# Altium schematic symbol library components.SchLib: 127 symbols
Pins are listed as number, name and electrical type; pins without a type are passive.

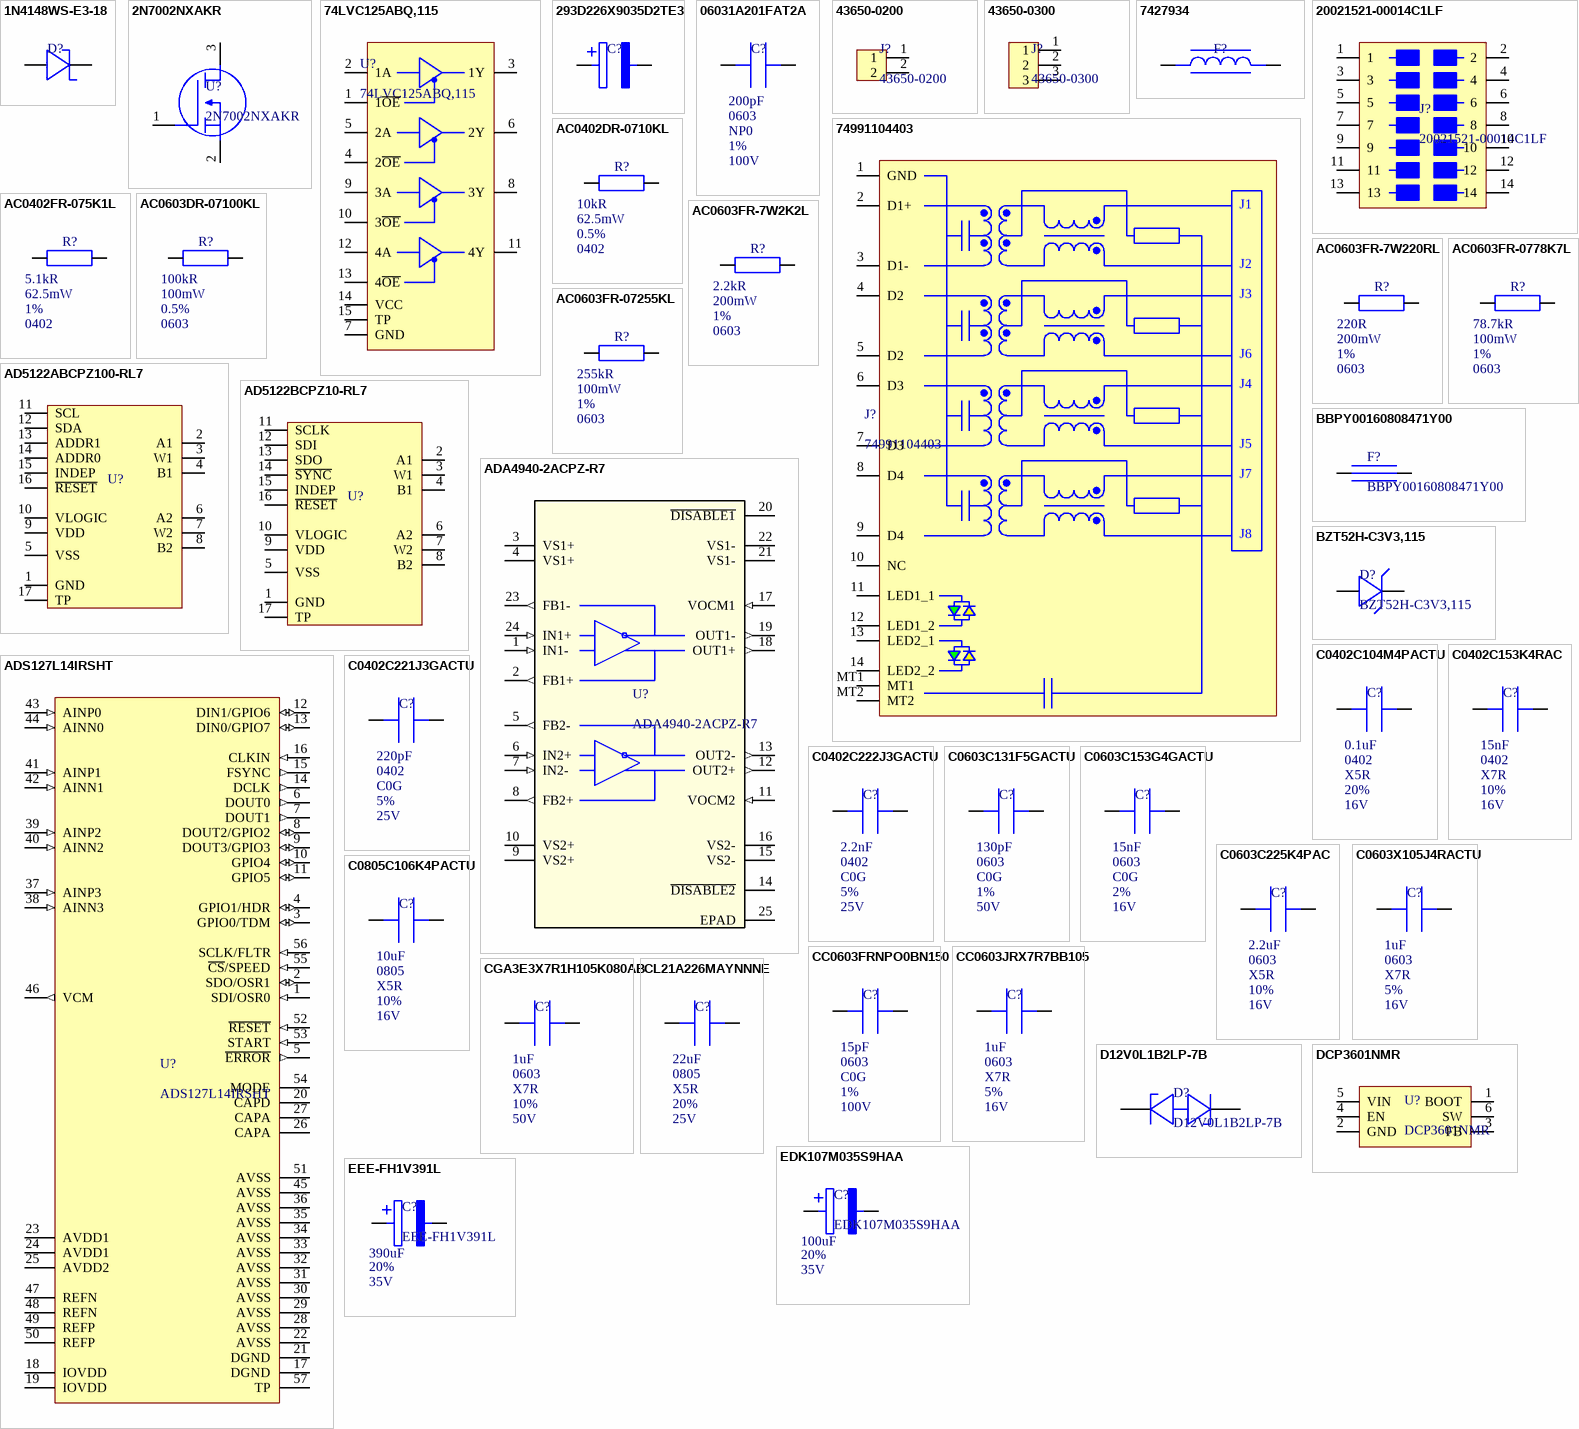
[diagram p0: symbols 1N4148WS-E3-18 to EEE-FH1V391L]

## 1N4148WS-E3-18
designator D?  (value not drawn)
Small Signal Switching Diodes 100 Volt 350mA 4ns; Manufacturer: Vishay; Package: SOD-323-2; Supplier 1: Mouser; Supplier Part Number 1: 78-1N4148WS-E3-18
footprint DIOC_SOD323_P
pins: 1, 2

## 2N7002NXAKR
designator U?
MOSFETs SOT23 N-CH 60V .3A; Manufacturer: Nexperia; Package: SOT23-3; Supplier 1: Mouser; Supplier Part Number 1: 771-2N7002NXAKR
footprint IC_SOT-23-3 (SOT23, 3-Leads, Body 2,90x2,90mm, Pitch 0,95mm, IPC Medium Density)
pins: 1 G, 2 S, 3 D

## 74LVC125ABQ,115
designator U?
Buffers & Line Drivers SOT762-1 BUFFERS & LINE DVRS; Manufacturer: Nexperia; Package: DHVQFN-14; Supplier 1: Mouser; Supplier Part Number 1: 771-LVC125ABQ115
footprint IC_DHVQFN-14
pins: 1 1~{OE}, 2 1A, 3 1Y, 4 2~{OE}, 5 2A, 6 2Y, 7 GND, 8 3Y, 9 3A, 10 3~{OE}, 11 4Y, 12 4A, 13 4~{OE}, 14 VCC, 15 TP

## 293D226X9035D2TE3
designator C?  (value not drawn)
Tantalum Capacitors - Solid SMD 22uF 35volts 10% D case Molded; Manufacturer: Vishay; Voltage: 35V; Value: 22uF; Tolerance: 10%; Package: 2917; Supplier 1: Mouser; Supplier Part Number 1: 74-293D226X9035D2TE3
footprint CAPC_2917_P
pins: 1, 2

## 06031A201FAT2A
designator C?  value 200pF  Voltage: 100V  Tolerance: 1%  Dielectric: NP0  Package: 0603  (hidden comment: 06031A201FAT2A)
Multilayer Ceramic Capacitors MLCC - SMD/SMT 100V 200pF NP0 0603 +1%; Manufacturer: KYOCERA AVX; Supplier 1: Mouser; Supplier Part Number 1: 581-06031A201FAT2A
footprint CAPC_0603 (Chip Capacitor, 2-Leads, Body 1,60x0,80mm, IPC Medium Density)
pins: 1, 2

## 43650-0200
designator J?
Nr Mouser: / 538-43650-0200 / Nr prod.: / 43650-0200 / Produc.: / Molex / Nr klienta: / Nr klienta / Opis: / Headers & Wire Housings R/A HEADER 2 POS TIN SINGLE ROW; Pin number: 2; Manufacturer: Molex; Supplier 1: Mouser; Supplier Part Number 1: 538-43650-0200
footprint CONT_43650-0200
pins: 1, 2

## 43650-0300
designator J?
Headers & Wire Housings R/A HEADER 3 POS TIN SINGLE ROW; Manufacturer: Molex; Pin number: 3; Supplier 1: Mouser; Supplier Part Number 1: 538-43650-0300
footprint CONT_43650-0300
pins: 1, 2, 3

## 7427934
designator F?  (value not drawn)
Ferrite Beads WE-PBF 4030 42 Ohms IR = 15 A RDC = 0.6 mOhms; Manufacturer: Wurth Elektronik; Package: 4030; Supplier 1: Mouser; Supplier Part Number 1: 710-7427934
footprint FERC_4030
pins: 1, 2

## 20021521-00014C1LF
designator J?
Headers & Wire Housings VERTICAL SMT TYPE HEADER; Manufacturer: Amphenol FCI; Supplier 1: Mouser; Supplier Part Number 1: 649-202152100014C1LF
footprint CONS_20021521-00014C1LF
pins: 1, 2, 3, 4, 5, 6, 7, 8, 9, 10, 11, 12, 13, 14

## 74991104403
designator J?
Modular Connectors / Ethernet Connectors WE-RJ45LAN 10/100/1000BASE-T THT 1x1 LED L green/yellow LED R green/yellow; Manufacturer: Wurth Elektronik; Supplier 1: Mouser; Supplier Part Number 1: 710-74991104403
footprint CONT_74991104403
pins: 1 GND, 2 D1+, 3 D1-, 4 D2, 5 D2, 6 D3, 7 D3, 8 D4, 9 D4, 10 NC, 11 LED1_1, 12 LED1_2, 13 LED2_1, 14 LED2_2, MT1, MT2
text: J1; J2; J3; J6; J4; J5; J7; J8

## AC0402DR-0710KL
designator R?  value 10kR  Package: 0402  Tolerance: 0.5%  Power: 62.5mW  (hidden comment: AC0402DR-0710KL)
Thick Film Resistors - SMD 10 kOhms 1/16 W 50 V 1% 0402 100 PPM / C - 55 C + 155 C AEC-Q200; Manufacturer: YAGEO; Supplier 1: Mouser; Supplier Part Number 1: 603-AC0402DR-0710KL
footprint RESC_0402 (Chip Resistor, 2-Leads, Body 1,00x0,50mm, IPC Medium Density)
pins: 1, 2

## AC0402FR-075K1L
designator R?  value 5.1kR  Package: 0402  Tolerance: 1%  Power: 62.5mW  (hidden comment: AC0402FR-075K1L)
Thick Film Resistors - SMD 5.1 kOhms 1/16 W 50 V 1 % 0402 100 PPM / C - 55 C / + 155 C AEC-Q200; Manufacturer: YAGEO; Supplier 1: Mouser; Supplier Part Number 1: 603-AC0402FR-075K1L
footprint RESC_0402 (Chip Resistor, 2-Leads, Body 1,00x0,50mm, IPC Medium Density)
pins: 1, 2

## AC0603DR-07100KL
designator R?  value 100kR  Package: 0603  Tolerance: 0.5%  Power: 100mW  (hidden comment: AC0603DR-07100KL)
Thick Film Resistors - SMD 100 kOhms 1/10 W 75 V 0.5 % 0603 100 PPM / C - 55 C / + 155 C AEC-Q200; Manufacturer: YAGEO; Supplier 1: Mouser; Supplier Part Number 1: 603-AC0603DR-07100KL
footprint RESC_0603 (Chip Resistor, 2-Leads, Body 1,55x0,85mm, IPC Medium Density)
pins: 1, 2

## AC0603FR-7W2K2L
designator R?  value 2.2kR  Package: 0603  Tolerance: 1%  Power: 200mW  (hidden comment: AC0603FR-7W2K2L)
Thick Film Resistors 2.2 kOhms 1/5 W 75 V 1% 0603 100 PPM / C - 55 C / + 155 C AEC-Q200; Manufacturer: YAGEO; Supplier 1: Mouser; Supplier Part Number 1: 603-AC0603FR-7W2K2L
footprint RESC_0603 (Chip Resistor, 2-Leads, Body 1,55x0,85mm, IPC Medium Density)
pins: 1, 2

## AC0603FR-7W220RL
designator R?  value 220R  Package: 0603  Tolerance: 1%  Power: 200mW  (hidden comment: AC0603FR-7W220RL)
Thick Film Resistors - SMD 220 Ohms 1/5 W 75 V 1% 0603 100 PPM / C - 55 C / + 155 C AEC-Q200; Manufacturer: YAGEO; Supplier 1: Mouser; Supplier Part Number 1: 603-AC0603FR-7W220RL
footprint RESC_0603 (Chip Resistor, 2-Leads, Body 1,55x0,85mm, IPC Medium Density)
pins: 1, 2

## AC0603FR-0778K7L
designator R?  value 78.7kR  Package: 0603  Tolerance: 1%  Power: 100mW  (hidden comment: AC0603FR-0778K7L)
Thick Film Resistors - SMD 78.7 kOhms 1/10 W 75 V 1% 0603 100 PPM / C - 55 C / + 155 C AEC-Q200; Manufacturer: YAGEO; Supplier 1: Mouser; Supplier Part Number 1: 603-AC0603FR-0778K7L
footprint RESC_0603 (Chip Resistor, 2-Leads, Body 1,55x0,85mm, IPC Medium Density)
pins: 1, 2

## AC0603FR-07255KL
designator R?  value 255kR  Package: 0603  Tolerance: 1%  Power: 100mW  (hidden comment: AC0603FR-07255KL)
Thick Film Resistors - SMD 255 kOhms 1/10 W 75 V 1 % 0603 100 PPM / C - 55 C / + 155 C AEC-Q200; Manufacturer: YAGEO; Supplier 1: Mouser; Supplier Part Number 1: 603-AC0603FR-07255KL
footprint RESC_0603 (Chip Resistor, 2-Leads, Body 1,55x0,85mm, IPC Medium Density)
pins: 1, 2

## AD5122ABCPZ100-RL7
designator U?  (value not drawn)
Digital Potentiometer ICs 128tap, Dual DigiPOT, NVM, I2C; Manufacturer: Analog Devices; Package: LFCSP-16; Supplier 1: Mouser; Supplier Part Number 1: 584-AD5122ABCPZ100R7
footprint IC_LFCSP-16
pins: 1 GND, 2 A1, 3 W1, 4 B1, 5 VSS, 6 A2, 7 W2, 8 B2, 9 VDD, 10 VLOGIC, 11 SCL, 12 SDA, 13 ADDR1, 14 ADDR0, 15 INDEP, 16 ~{RESET}, 17 TP

## AD5122BCPZ10-RL7
designator U?  (value not drawn)
Digital Potentiometer ICs 128tap, Dual DigiPOT, NVM, SPI; Manufacturer: Analog Devices; Package: LFCSP-16; Supplier 1: Mouser; Supplier Part Number 1: 584-AD5122BCPZ10-R7
footprint IC_LFCSP-16
pins: 1 GND, 2 A1, 3 W1, 4 B1, 5 VSS, 6 A2, 7 W2, 8 B2, 9 VDD, 10 VLOGIC, 11 SCLK, 12 SDI, 13 SDO, 14 ~{SYNC}, 15 INDEP, 16 ~{RESET}, 17 TP

## ADA4940-2ACPZ-R7
designator U?
Differential Amplifiers Sub 10M W ADC Driver for PULSAR Family; Manufacturer: Analog Devices; Package: LFCSP-24; Supplier 1: Mouser; Supplier Part Number 1: 584-ADA4940-2ACPZ-R7
footprint IC_QFN-24_UF_LIT
pins: 1 IN1- (in), 2 FB1+ (out), 3 VS1+ (power), 4 VS1+ (power), 5 FB2- (out), 6 IN2+ (in), 7 IN2- (in), 8 FB2+ (out), 9 VS2+ (power), 10 VS2+ (power), 11 VOCM2 (in), 12 OUT2+ (out), 13 OUT2- (out), 14 ~{DISABLE2}, 15 VS2- (power), 16 VS2- (power), 17 VOCM1 (in), 18 OUT1+ (out), 19 OUT1- (out), 20 ~{DISABLE1}, 21 VS1- (power), 22 VS1- (power), 23 FB1- (out), 24 IN1+ (in), 25 EPAD

## ADS127L14IRSHT
designator U?
Analog to Digital Converters - ADC; Manufacturer: Texas Instruments; Package: VQFN-56; Supplier 1: Mouser; Supplier Part Number 1: 595-ADS127L14IRSHT
footprint IC_VQFN56 (VQFN, 56-Leads, Body 7,00x7,00mm, Pitch 0,40mm, Thermal Pad 5,28x5,28mm, IPC Medium Density)
pins: 1 SDI/OSR0 (in), 2 SDO/OSR1 (io), 3 GPIO0/TDM (io), 4 GPIO1/HDR (io), 5 ~{ERROR} (out), 6 DOUT0 (out), 7 DOUT1 (out), 8 DOUT2/GPIO2 (io), 9 DOUT3/GPIO3 (io), 10 GPIO4 (io), 11 GPIO5 (io), 12 DIN1/GPIO6 (io), 13 DIN0/GPIO7 (io), 14 DCLK (out), 15 FSYNC (out), 16 CLKIN (in), 17 DGND, 18 IOVDD, 19 IOVDD, 20 CAPD, 21 DGND, 22 AVSS, 23 AVDD1, 24 AVDD1, 25 AVDD2, 26 CAPA, 27 CAPA, 28 AVSS, 29 AVSS, 30 AVSS, 31 AVSS, 32 AVSS, 33 AVSS, 34 AVSS, 35 AVSS, 36 AVSS, 37 AINP3 (in), 38 AINN3 (in), 39 AINP2 (in), 40 AINN2 (in), 41 AINP1 (in), 42 AINN1 (in), 43 AINP0 (in), 44 AINN0 (in), 45 AVSS, 46 VCM (out), 47 REFN, 48 REFN, 49 REFP, 50 REFP, 51 AVSS, 52 ~{RESET} (in), 53 START (in), 54 MODE, 55 ~{CS}/SPEED (in), 56 SCLK/FLTR (in), 57 TP

## BBPY00160808471Y00
designator F?
Ferrite Beads 470Ohms RDC=0.15Ohms 1500mA; Manufacturer: Pulse Electronics; Package: 0603; Supplier 1: Mouser; Supplier Part Number 1: 603-BBPY160808471Y00
footprint FERC_0603 (Chip Resistor, 2-Leads, Body 1,55x0,85mm, IPC Medium Density)
pins: 1, 2

## BZT52H-C3V3,115
designator D?
Zener Diodes ZENER SOD-123 .83W 3.3V; Manufacturer: Nexperia; Package: SOD-123F-2; Breakdown voltage: 3.3V; Supplier 1: Mouser; Supplier Part Number 1: 771-BZT52H-C3V3-T/R
footprint DIOC_SOD-123F-2
pins: 1, 2

## C0402C104M4PACTU
designator C?  value 0.1uF  Voltage: 16V  Tolerance: 20%  Dielectric: X5R  Package: 0402  (hidden comment: C0402C104M4PACTU)
Multilayer Ceramic Capacitors MLCC - SMD/SMT 16V 0.1uF X5R 0402 20%; Manufacturer: KEMET; Supplier 1: Mouser; Supplier Part Number 1: 80-C0402C104M4P
footprint CAPC_0402 (Chip Capacitor, 2-Leads, Body 1,00x0,50mm, IPC Medium Density)
pins: 1, 2

## C0402C153K4RAC
designator C?  value 15nF  Voltage: 16V  Tolerance: 10%  Dielectric: X7R  Package: 0402  (hidden comment: C0402C153K4RAC)
Multilayer Ceramic Capacitors MLCC - SMD/SMT 16V 0.015uF X7R 0402 10%; Manufacturer: KEMET; Supplier 1: Mouser; Supplier Part Number 1: 80-C0402C153K4RAC
footprint CAPC_0402 (Chip Capacitor, 2-Leads, Body 1,00x0,50mm, IPC Medium Density)
pins: 1, 2

## C0402C221J3GACTU
designator C?  value 220pF  Voltage: 25V  Tolerance: 5%  Dielectric: C0G  Package: 0402  (hidden comment: C0402C221J3GACTU)
Multilayer Ceramic Capacitors MLCC - SMD/SMT 25V 220pF C0G 0402 5%; Manufacturer: KEMET; Supplier 1: Mouser; Supplier Part Number 1: 80-C0402C221J3G
footprint CAPC_0402 (Chip Capacitor, 2-Leads, Body 1,00x0,50mm, IPC Medium Density)
pins: 1, 2

## C0402C222J3GACTU
designator C?  value 2.2nF  Voltage: 25V  Tolerance: 5%  Dielectric: C0G  Package: 0402  (hidden comment: C0402C222J3GACTU)
Multilayer Ceramic Capacitors MLCC - SMD/SMT 25V 2200pF C0G 0402 5%; Manufacturer: KEMET; Supplier 1: Mouser; Supplier Part Number 1: 80-C0402C222J3GACTU
footprint CAPC_0402 (Chip Capacitor, 2-Leads, Body 1,00x0,50mm, IPC Medium Density)
pins: 1, 2

## C0603C131F5GACTU
designator C?  value 130pF  Voltage: 50V  Tolerance: 1%  Dielectric: C0G  Package: 0603  (hidden comment: C0603C131F5GACTU)
Multilayer Ceramic Capacitors MLCC - SMD/SMT 50V 130pF C0G 0603 1%; Manufacturer: KEMET; Supplier 1: Mouser; Supplier Part Number 1: 80-C0603C131F5G
footprint CAPC_0603 (Chip Capacitor, 2-Leads, Body 1,60x0,80mm, IPC Medium Density)
pins: 1, 2

## C0603C153G4GACTU
designator C?  value 15nF  Voltage: 16V  Tolerance: 2%  Dielectric: C0G  Package: 0603  (hidden comment: C0603C153G4GACTU)
Multilayer Ceramic Capacitors MLCC - SMD/SMT 16V 0.015uF C0G 0603 2%; Manufacturer: KEMET; Supplier 1: Mouser; Supplier Part Number 1: 80-C0603C153G4G
footprint CAPC_0603 (Chip Capacitor, 2-Leads, Body 1,60x0,80mm, IPC Medium Density)
pins: 1, 2

## C0603C225K4PAC
designator C?  value 2.2uF  Voltage: 16V  Tolerance: 10%  Dielectric: X5R  Package: 0603  (hidden comment: C0603C225K4PAC)
Multilayer Ceramic Capacitors MLCC - SMD/SMT 16V 2.2uF X5R 0603 10%; Manufacturer: KEMET; Supplier 1: Mouser; Supplier Part Number 1: 80-C0603C225K4PAC
footprint CAPC_0603 (Chip Capacitor, 2-Leads, Body 1,60x0,80mm, IPC Medium Density)
pins: 1, 2

## C0603X105J4RACTU
designator C?  value 1uF  Voltage: 16V  Tolerance: 5%  Dielectric: X7R  Package: 0603  (hidden comment: C0603X105J4RACTU)
Multilayer Ceramic Capacitors MLCC - SMD/SMT 16V 1uF X7R 0603 5% Flex Soft; Manufacturer: KEMET; Supplier 1: Mouser; Supplier Part Number 1: 80-C0603X105J4R
footprint CAPC_0603 (Chip Capacitor, 2-Leads, Body 1,60x0,80mm, IPC Medium Density)
pins: 1, 2

## C0805C106K4PACTU
designator C?  value 10uF  Voltage: 16V  Tolerance: 10%  Dielectric: X5R  Package: 0805  (hidden comment: C0805C106K4PACTU)
Multilayer Ceramic Capacitors MLCC - SMD/SMT 16V 10uF X5R 0805 10%; Manufacturer: KEMET; Supplier 1: Mouser; Supplier Part Number 1: 80-C0805C106K4P
footprint CAPC_0805 (Chip Capacitor, 2-Leads, Body 2,00x1,25mm, IPC Medium Density)
pins: 1, 2

## CC0603FRNPO0BN150
designator C?  value 15pF  Voltage: 100V  Tolerance: 1%  Dielectric: C0G  Package: 0603  (hidden comment: CC0603FRNPO0BN150)
Multilayer Ceramic Capacitors MLCC - SMD/SMT 100V 15pF C0G 0603 1%; Manufacturer: YAGEO; Supplier 1: Mouser; Supplier Part Number 1: 603-CC603FRNPO0BN150
footprint CAPC_0603 (Chip Capacitor, 2-Leads, Body 1,60x0,80mm, IPC Medium Density)
pins: 1, 2

## CC0603JRX7R7BB105
designator C?  value 1uF  Voltage: 16V  Tolerance: 5%  Dielectric: X7R  Package: 0603  (hidden comment: CC0603JRX7R7BB105)
Multilayer Ceramic Capacitors MLCC - SMD/SMT 16V 1uF X7R 0603 5% HI CV; Manufacturer: YAGEO; Supplier 1: Mouser; Supplier Part Number 1: 603-CC0603JRX77BB105
footprint CAPC_0603 (Chip Capacitor, 2-Leads, Body 1,60x0,80mm, IPC Medium Density)
pins: 1, 2

## CGA3E3X7R1H105K080AB
designator C?  value 1uF  Voltage: 50V  Tolerance: 10%  Dielectric: X7R  Package: 0603  (hidden comment: CGA3E3X7R1H105K080AB)
Multilayer Ceramic Capacitors MLCC - SMD/SMT Automotive Grade,MLCC,0603,X7R,50V,1uF,+/-10%,0.8mm; Manufacturer: TDK; Supplier 1: Mouser; Supplier Part Number 1: 810-CGA3E3X7R1H105K0
footprint CAPC_0603 (Chip Capacitor, 2-Leads, Body 1,60x0,80mm, IPC Medium Density)
pins: 1, 2

## CL21A226MAYNNNE
designator C?  value 22uF  Voltage: 25V  Tolerance: 20%  Dielectric: X5R  Package: 0805  (hidden comment: CL21A226MAYNNNE)
Multilayer Ceramic Capacitors MLCC - SMD/SMT 22uF+/-20% 25V X5R 2 0805; Manufacturer: TAIYO YUDEN; Supplier 1: Mouser; Supplier Part Number 1: 187-CL21A226MAYNNNE
footprint CAPC_0805 (Chip Capacitor, 2-Leads, Body 2,00x1,25mm, IPC Medium Density)
pins: 1, 2

## D12V0L1B2LP-7B
designator D?
ESD Protection Diodes / TVS Diodes Data Line Protection TVS Bi 13V 4A 10pF; Manufacturer: Diodes Incorporated; Voltage: 12V; Package: DFN1006-2; Capacitance: 10pF; Supplier 1: Mouser; Supplier Part Number 1: 621-D12V0L1B2LP-7B
footprint DIOC_DFN-1006-2
pins: 1, 2

## DCP3601NMR
designator U?
Switching Voltage Regulators 36 V, 1 A synchronous step-down converter in SOT23-6L; Manufacturer: STMicroelectronics; Package: SOT23-6; Supplier 1: Mouser; Supplier Part Number 1: 511-DCP3601NMR
footprint IC_SOT23-6 (SOT23, 6-Leads, Body 2,90x2,90mm, Pitch 0,95mm, IPC Medium Density)
pins: 1 BOOT, 2 GND, 3 FB, 4 EN, 5 VIN, 6 SW

## EDK107M035S9HAA
designator C?  value 100uF  Voltage: 35V  Tolerance: 20%
Aluminum Electrolytic Capacitors - SMD 35V 100uF AEC-Q200 20% 85C/2K Hours; Manufacturer: KEMET; Package: 6.3x7.7; Supplier 1: Mouser; Supplier Part Number 1: 80-EDK107M035S9HAA
footprint CAPE_6.3R_7.7H
pins: 1, 2

## EEE-FH1V391L
designator C?  value 390uF  Voltage: 35V  Tolerance: 20%
Aluminium Electrolytic Capacitors - SMD 35VDC 390uF 20% Halogen Free AEC-Q200; Manufacturer: Panasonic; Package: 10x10.2; Supplier 1: Mouser; Supplier Part Number 1: 667-EEE-FH1V391L
footprint CAPE_10R_10H (Aluminum Electrolytic Capacitor, Body 10,30x10,30x10,50mm, IPC Medium Density)
pins: 1, 2

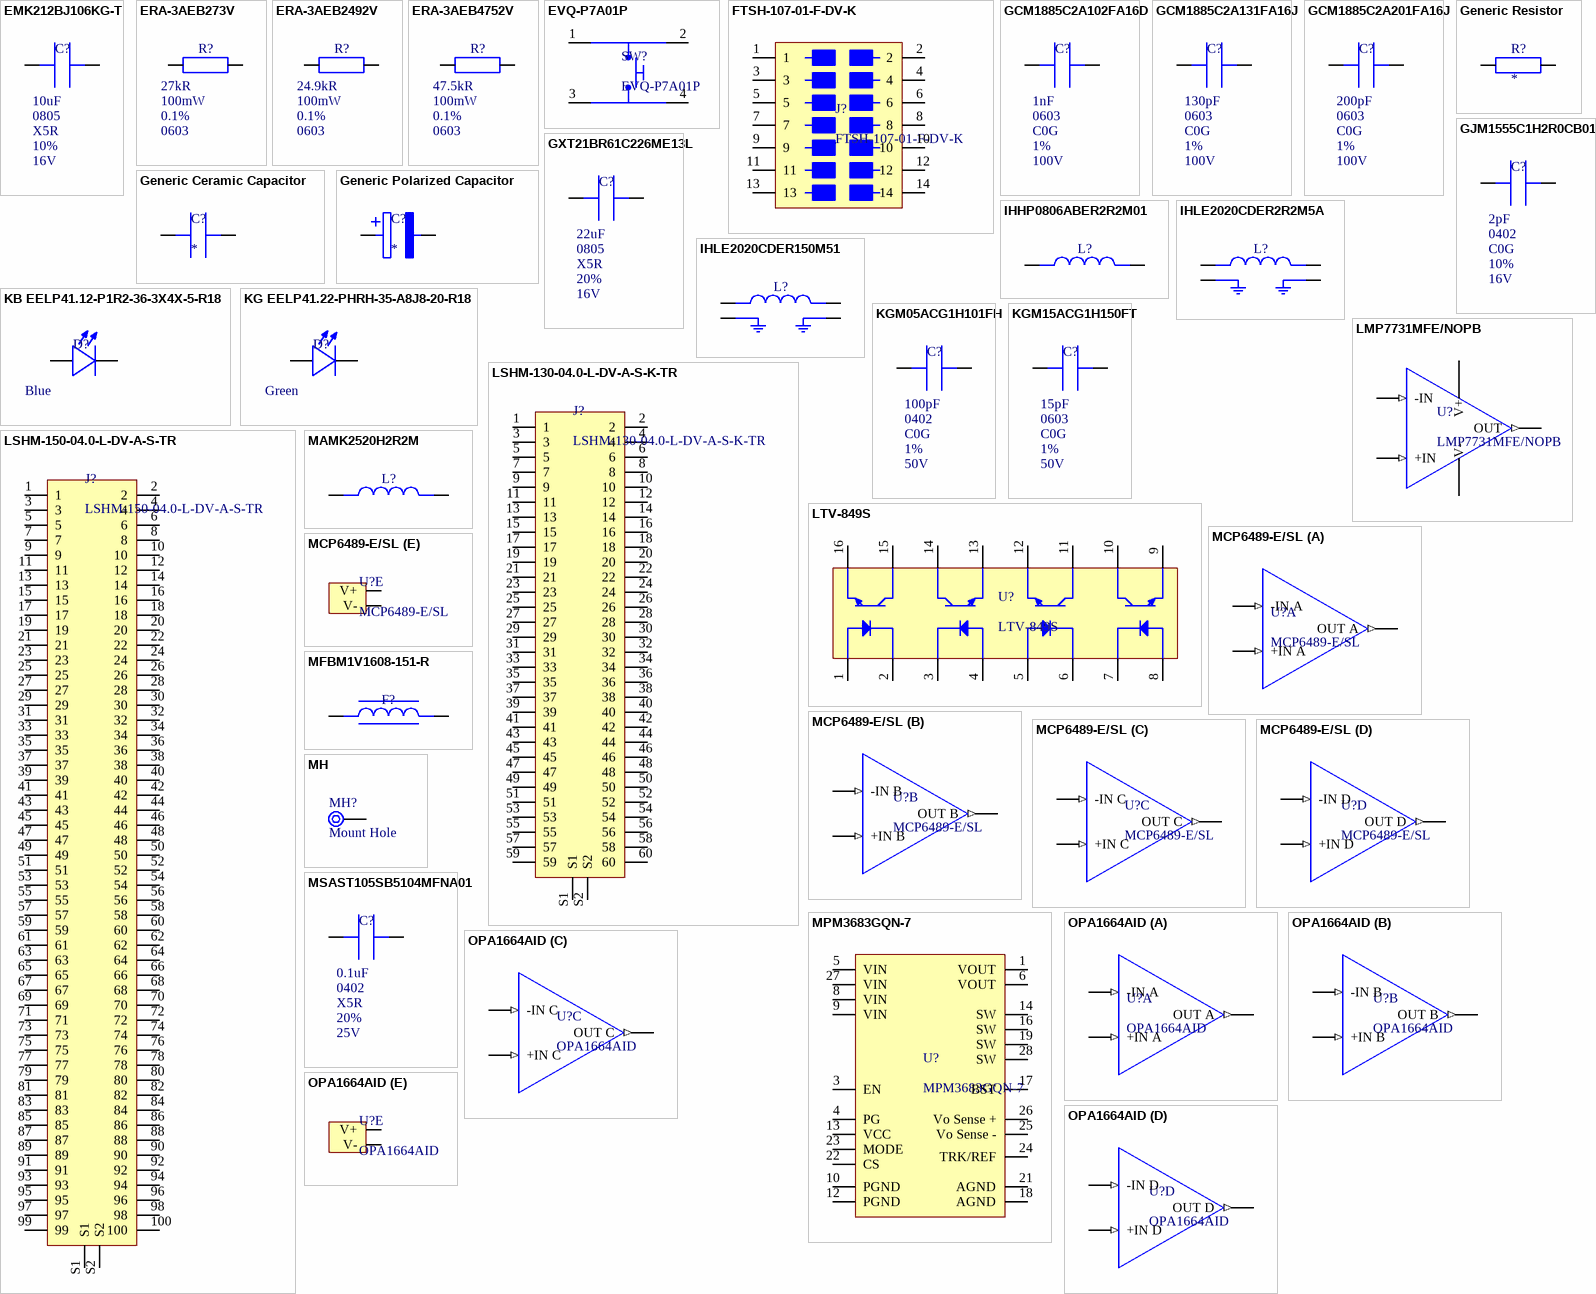
[diagram p1: symbols EMK212BJ106KG-T to OPA1664AID]

## EMK212BJ106KG-T
designator C?  value 10uF  Voltage: 16V  Tolerance: 10%  Dielectric: X5R  Package: 0805  (hidden comment: EMK212BJ106KG-T)
Multilayer Ceramic Capacitors MLCC - SMD/SMT 16V 10uF X5R 0805 10 %; Manufacturer: TAIYO YUDEN; Supplier 1: Mouser; Supplier Part Number 1: 963-EMK212BJ106KG-T
footprint CAPC_0805 (Chip Capacitor, 2-Leads, Body 2,00x1,25mm, IPC Medium Density)
pins: 1, 2

## ERA-3AEB273V
designator R?  value 27kR  Package: 0603  Tolerance: 0.1%  Power: 100mW  (hidden comment: ERA-3AEB273V)
Thin Film Resistors 0603 1/10W 27Kohms; Manufacturer: Panasonic; Supplier 1: Mouser; Supplier Part Number 1: 667-ERA-3AEB273V
footprint RESC_0603 (Chip Resistor, 2-Leads, Body 1,55x0,85mm, IPC Medium Density)
pins: 1, 2

## ERA-3AEB2492V
designator R?  value 24.9kR  Package: 0603  Tolerance: 0.1%  Power: 100mW  (hidden comment: ERA-3AEB2492V)
Thin Film Resistors 0603 24.9Kohm 0.1% 25ppm; Manufacturer: Panasonic; Supplier 1: Mouser; Supplier Part Number 1: 667-ERA-3AEB2492V
footprint RESC_0603 (Chip Resistor, 2-Leads, Body 1,55x0,85mm, IPC Medium Density)
pins: 1, 2

## ERA-3AEB4752V
designator R?  value 47.5kR  Package: 0603  Tolerance: 0.1%  Power: 100mW  (hidden comment: ERA-3AEB4752V)
Thin Film Resistors 0603 47.5Kohm 0.1% 25ppm; Manufacturer: Panasonic; Supplier 1: Mouser; Supplier Part Number 1: 667-ERA-3AEB4752V
footprint RESC_0603 (Chip Resistor, 2-Leads, Body 1,55x0,85mm, IPC Medium Density)
pins: 1, 2

## EVQ-P7A01P
designator SW?
Tactile Switches 3.5x2.9mm Right Ang Light Touch Switch; Manufacturer: Panasonic; Supplier 1: Mouser; Supplier Part Number 1: 667-EVQP7A01P
footprint SWS_EVQP7A
pins: 1, 2, 3, 4

## FTSH-107-01-F-DV-K
designator J?
Headers & Wire Housings High Reliability Header Strips; Manufacturer: Samtec; Supplier 1: Mouser; Supplier Part Number 1: 200-FTSH10701FDVK
footprint CONS_FTSH-107-01-F-DV-K
pins: 1, 2, 3, 4, 5, 6, 7, 8, 9, 10, 11, 12, 13, 14

## GCM1885C2A102FA16D
designator C?  value 1nF  Voltage: 100V  Tolerance: 1%  Dielectric: C0G  Package: 0603  (hidden comment: GCM1885C2A102FA16D)
Multilayer Ceramic Capacitors MLCC - SMD/SMT 1000 pF 100 VDC 1% 0603 C0G (NP0) AEC-Q200; Manufacturer: Murata Electronics; Supplier 1: Mouser; Supplier Part Number 1: 81-GCM1885C2A102FA6D
footprint CAPC_0603 (Chip Capacitor, 2-Leads, Body 1,60x0,80mm, IPC Medium Density)
pins: 1, 2

## GCM1885C2A131FA16J
designator C?  value 130pF  Voltage: 100V  Tolerance: 1%  Dielectric: C0G  Package: 0603  (hidden comment: GCM1885C2A131FA16J)
Multilayer Ceramic Capacitors MLCC - SMD/SMT 130 pF 100 VDC 1% 0603 C0G (NP0) AEC-Q200; Manufacturer: Murata Electronics; Supplier 1: Mouser; Supplier Part Number 1: 81-GCM1885C2A131FA6J
footprint CAPC_0603 (Chip Capacitor, 2-Leads, Body 1,60x0,80mm, IPC Medium Density)
pins: 1, 2

## GCM1885C2A201FA16J
designator C?  value 200pF  Voltage: 100V  Tolerance: 1%  Dielectric: C0G  Package: 0603  (hidden comment: GCM1885C2A201FA16J)
Multilayer Ceramic Capacitors MLCC - SMD/SMT 200 pF 100 VDC 1% 0603 C0G (NP0) AEC-Q200; Manufacturer: Murata Electronics; Supplier 1: Mouser; Supplier Part Number 1: 81-GCM1885C2A201FA6J
footprint CAPC_0603 (Chip Capacitor, 2-Leads, Body 1,60x0,80mm, IPC Medium Density)
pins: 1, 2

## Generic Ceramic Capacitor
designator C?
Value: *; Package: *; Dielectric: *; Tolerance: *; Voltage: *; Manufacturer: *
pins: 1, 2

## Generic Polarized Capacitor
designator C?
Value: *; Tolerance: *; Voltage: *; Manufacturer: *; Package: *
pins: 1, 2

## Generic Resistor
designator R?
Power: *; Tolerance: *; Value: *; Package: *; Manufacturer: *
pins: 1, 2

## GJM1555C1H2R0CB01J
designator C?  value 2pF  Voltage: 16V  Tolerance: 10%  Dielectric: C0G  Package: 0402  (hidden comment: GJM1555C1H2R0CB01J)
Multilayer Ceramic Capacitors MLCC - SMD/SMT 2 pF 50 VDC 0.25 pF 0402 C0G (NP0); Manufacturer: Murata Electronics; Supplier 1: Mouser; Supplier Part Number 1: 81-GJM1555C1H2R0CB1J
footprint CAPC_0402 (Chip Capacitor, 2-Leads, Body 1,00x0,50mm, IPC Medium Density)
pins: 1, 2

## GXT21BR61C226ME13L
designator C?  value 22uF  Voltage: 16V  Tolerance: 20%  Dielectric: X5R  Package: 0805  (hidden comment: GXT21BR61C226ME13L)
Multilayer Ceramic Capacitors MLCC - SMD/SMT 16V 2.2uF X5R 0603 10%; Manufacturer: Murata Electronics; Supplier 1: Mouser; Supplier Part Number 1: 81-GXT21BR61C226ME3L
footprint CAPC_0805 (Chip Capacitor, 2-Leads, Body 2,00x1,25mm, IPC Medium Density)
pins: 1, 2

## IHHP0806ABER2R2M01
designator L?  (value not drawn)
Power Inductors - SMD 2.2uH 20% LowProfile High Current; Manufacturer: Vishay; Saturation Current: 1.9A; Inductance: 2.2uH; Tolerance: 20%; Package: 0806; Supplier 1: Mouser; Supplier Part Number 1: 70-IHHP0806ABR2R2M01
footprint IND_0806
pins: 1, 2

## IHLE2020CDER2R2M5A
designator L?  (value not drawn)
Power Inductors - SMD 2.2uH 20% w/E-Field AEC-Q200; Manufacturer: Vishay; Saturation Current: 7.9A; Package: 2020; Tolerance: 20%; Inductance: 2.2uH; Supplier 1: Mouser; Supplier Part Number 1: 70-IHLE2020CDR2R2M5A
footprint IND_2020_S
pins: 1, 2, 3, 4

## IHLE2020CDER150M51
designator L?  (value not drawn)
Power Inductors - SMD 15uH 20% w/E-Field; Manufacturer: Vishay; Saturation Current: 2.6A; Package: 2020; Tolerance: 20%; Inductance: 15uH; Supplier 1: Mouser; Supplier Part Number 1: 70-IHLE2020CDR150M51
footprint IND_2020_S
pins: 1, 2, 3, 4

## KB EELP41.12-P1R2-36-3X4X-5-R18
designator D?  color: Blue  (hidden comment: KB EELP41.12-P1R2-36-3X4X-5-R18)
Single Color LEDs; package: 0603; Supplier 1: Mouser; Supplier Part Number 1: 720-P4112P1R2363X4X5
footprint DIOC_0603_LED (Chip Capacitor, 2-Leads, Body 1,60x0,80mm, IPC Medium Density)
pins: 1, 2

## KG EELP41.22-PHRH-35-A8J8-20-R18
designator D?  color: Green  (hidden comment: KG EELP41.22-PHRH-35-A8J8-20-R18)
Single Color LEDs; package: 0603; Supplier 1: Mouser; Supplier Part Number 1: 720-P4122PHRH35A8J82
footprint DIOC_0603_LED (Chip Capacitor, 2-Leads, Body 1,60x0,80mm, IPC Medium Density)
pins: 1, 2

## KGM05ACG1H101FH
designator C?  value 100pF  Voltage: 50V  Tolerance: 1%  Dielectric: C0G  Package: 0402  (hidden comment: KGM05ACG1H101FH)
Multilayer Ceramic Capacitors MLCC - SMD/SMT 50V 100pF C0G 0402 1 %; Manufacturer: KYOCERA AVX; Supplier 1: Mouser; Supplier Part Number 1: 581-04025A101F
footprint CAPC_0402 (Chip Capacitor, 2-Leads, Body 1,00x0,50mm, IPC Medium Density)
pins: 1, 2

## KGM15ACG1H150FT
designator C?  value 15pF  Voltage: 50V  Tolerance: 1%  Dielectric: C0G  Package: 0603  (hidden comment: KGM15ACG1H150FT)
Multilayer Ceramic Capacitors MLCC - SMD/SMT 50V 15pF C0G 0603 1%; Manufacturer: KYOCERA AVX; Supplier 1: Mouser; Supplier Part Number 1: 581-06035A150FAT2A
footprint CAPC_0603 (Chip Capacitor, 2-Leads, Body 1,60x0,80mm, IPC Medium Density)
pins: 1, 2

## LMP7731MFE/NOPB
designator U?
Precision Amplifiers Single 2.9 nV/sqrt(H z) Low Noise Precis A 926-LMP7731MF/NOPB; Manufacturer: Texas Instruments; Package: SOT-23-5; Supplier 1: Mouser; Supplier Part Number 1: 926-LMP7731MFE/NOPB
footprint IC_SOT-23-5 (SOT23, 5-Leads, Body 2,90x2,90mm, Pitch 0,95mm, IPC Medium Density)
pins: 1 OUT (out), 2 V-, 3 +IN (in), 4 -IN (in), 5 V+

## LSHM-130-04.0-L-DV-A-S-K-TR
designator J?
Board to Board & Mezzanine Connectors 0.50 mm Razor Beam(TM) High-Speed Hermaphroditic Terminal/Socket Strip; Manufacturer: Samtec; Supplier 1: Mouser; Supplier Part Number 1: 200-LSHM15004.0LDVAS
footprint CONS_LSHM-130-04.0-L-DV-A-S-TR
pins: 1, 2, 3, 4, 5, 6, 7, 8, 9, 10, 11, 12, 13, 14, 15, 16, 17, 18, 19, 20, 21, 22, 23, 24, 25, 26, 27, 28, 29, 30, 31, 32, 33, 34, 35, 36, 37, 38, 39, 40, 41, 42, 43, 44, 45, 46, 47, 48, 49, 50, 51, 52, 53, 54, 55, 56, 57, 58, 59, 60, S1, S2

## LSHM-150-04.0-L-DV-A-S-TR
designator J?
Board to Board & Mezzanine Connectors 0.50 mm Razor Beam(TM) High-Speed Hermaphroditic Terminal/Socket Strip; Manufacturer: Samtec; Supplier 1: Mouser; Supplier Part Number 1: 200-LSHM15004.0LDVAS
footprint CONS_LSHM-150-04.0-L-DV-A-S-TR
pins: 1, 2, 3, 4, 5, 6, 7, 8, 9, 10, 11, 12, 13, 14, 15, 16, 17, 18, 19, 20, 21, 22, 23, 24, 25, 26, 27, 28, 29, 30, 31, 32, 33, 34, 35, 36, 37, 38, 39, 40, 41, 42, 43, 44, 45, 46, 47, 48, 49, 50, 51, 52, 53, 54, 55, 56, 57, 58, 59, 60, 61, 62, 63, 64, 65, 66, 67, 68, 69, 70, 71, 72, 73, 74, 75, 76, 77, 78, 79, 80, 81, 82, 83, 84, 85, 86, 87, 88, 89, 90, 91, 92, 93, 94, 95, 96, 97, 98, 99, 100, S1, S2

## LTV-849S
designator U?
Transistor Output Optocouplers Optocoupler; Manufacturer: LITEON; Package: PDIP-16 Gull Wing; Supplier 1: Mouser; Supplier Part Number 1: 859-LTV-849S
footprint IC_PDIP-16
pins: 1, 2, 3, 4, 5, 6, 7, 8, 9, 10, 11, 12, 13, 14, 15, 16

## MAMK2520H2R2M
designator L?  (value not drawn)
Power Inductors - SMD 963-LSAPB2520MKT2R2M RPLCMT PN 1008 2.2uH 90mOhmsur; Manufacturer: TAIYO YUDEN; Tolerance: 20%; Saturation Current: 2.8A; Inductance: 2.2uH; Package: 1008; Supplier 1: Mouser; Supplier Part Number 1: 963-MAMK2520H2R2M
footprint IND_1008
pins: 1, 2

## MCP6489-E/SL
designator U?
Manufacturer: Microchip Technology; Package: SOIC-14; Supplier 1: Mouser; Supplier Part Number 1: 494-MCP6489-E/SL
footprint IC_SOIC14 (SOIC, 14-Leads, Body 8,65x3,90mm, Pitch 1,27mm, IPC Medium Density)
part A pins: 1 OUT A (out), 2 -IN A (in), 3 +IN A (in)
part B pins: 5 +IN B (in), 6 -IN B (in), 7 OUT B (out)
part C pins: 8 OUT C (out), 9 -IN C (in), 10 +IN C (in)
part D pins: 12 +IN D (in), 13 -IN D (in), 14 OUT D (out)
part E pins: 4 V+, 11 V-

## MFBM1V1608-151-R
designator F?  (value not drawn)
Ferrite Beads 150 OHM 1.5A SMT; Manufacturer: Eaton Electronics; Package: 0603; Supplier 1: Mouser; Supplier Part Number 1: 704-MFBM1V1608-151-R
footprint FERC_0603 (Chip Resistor, 2-Leads, Body 1,55x0,85mm, IPC Medium Density)
pins: 1, 2

## MH
designator MH?, comment Mount Hole
footprint MT_M2
footprint MT_M3
pins: 1

## MPM3683GQN-7
designator U?
Power Management Modules 2.7V-16V, 8A, Step-Down Power Module; Manufacturer: Monolithic Power Systems (MPS); Supplier 1: Mouser; Supplier Part Number 1: 946-MPM3683GQN-7-Z
footprint IC_MPM3683GQN-7
pins: 1 VOUT, 3 EN, 4 PG, 5 VIN, 6 VOUT, 8 VIN, 9 VIN, 10 PGND, 12 PGND, 13 VCC, 14 SW, 16 SW, 17 BST, 18 AGND, 19 SW, 21 AGND, 22 CS, 23 MODE, 24 TRK/REF, 25 Vo Sense -, 26 Vo Sense +, 27 VIN, 28 SW

## MSAST105SB5104MFNA01
designator C?  value 0.1uF  Voltage: 25V  Tolerance: 20%  Dielectric: X5R  Package: 0402  (hidden comment: MSAST105SB5104MFNA01)
Multilayer Ceramic Capacitors MLCC - SMD/SMT 25V 0.1uF X5R 0402 20%; Manufacturer: TAIYO YUDEN; Supplier 1: Mouser; Supplier Part Number 1: 963-MSAST105SB5104MF
footprint CAPC_0402 (Chip Capacitor, 2-Leads, Body 1,00x0,50mm, IPC Medium Density)
pins: 1, 2

## OPA1664AID
designator U?
Operational Amplifiers - Op Amps Sound Plus Lo-Pwr Lo -Noise Op Amps A 595-OPA1664AIDR; Manufacturer: Texas Instruments; Package: SOIC-14; Supplier 1: Mouser; Supplier Part Number 1: 595-OPA1664AID
footprint IC_SOIC14 (SOIC, 14-Leads, Body 8,65x3,90mm, Pitch 1,27mm, IPC Medium Density)
part A pins: 1 OUT A (out), 2 -IN A (in), 3 +IN A (in)
part B pins: 5 +IN B (in), 6 -IN B (in), 7 OUT B (out)
part C pins: 8 OUT C (out), 9 -IN C (in), 10 +IN C (in)
part D pins: 12 +IN D (in), 13 -IN D (in), 14 OUT D (out)
part E pins: 4 V+, 11 V-

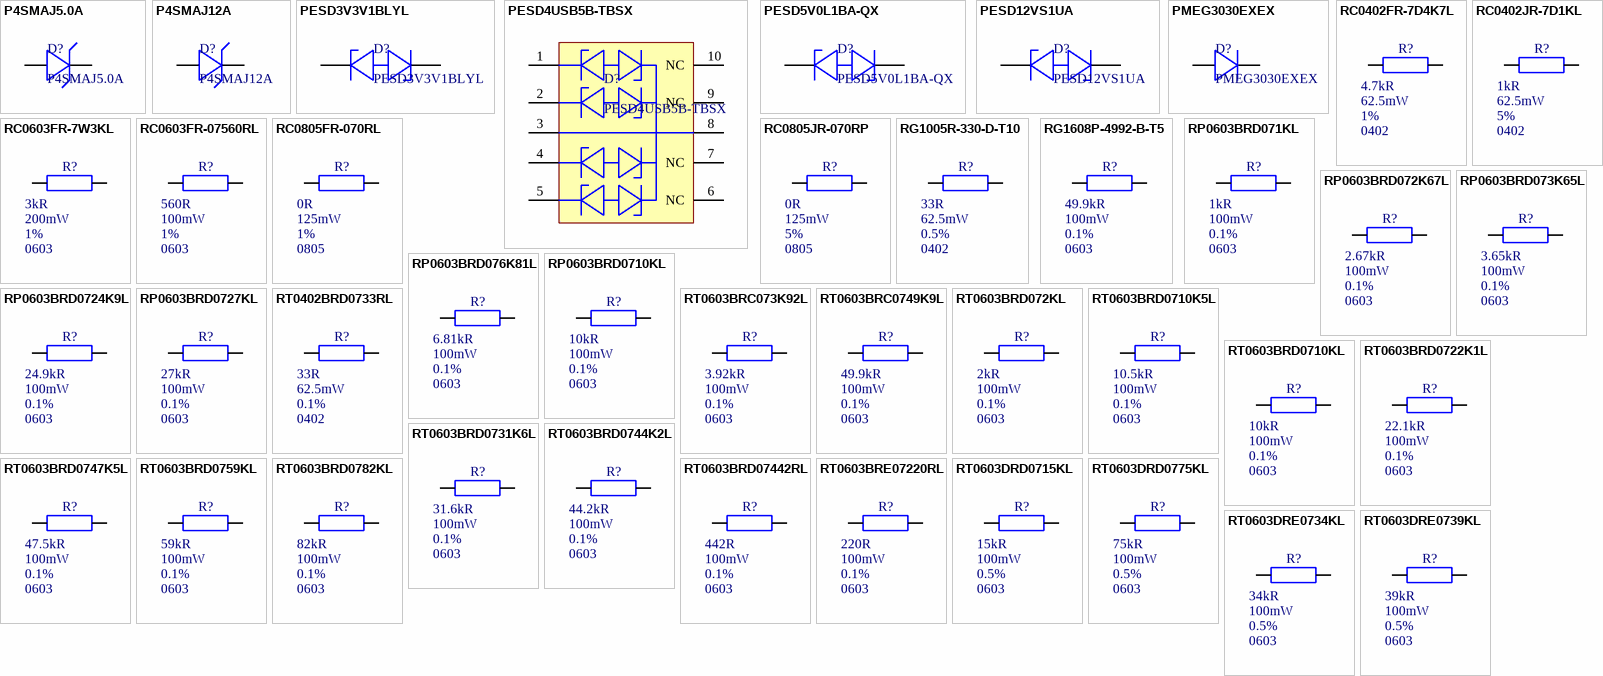
[diagram p2: symbols P4SMAJ5.0A to RT0603DRE0739KL]

## P4SMAJ5.0A
designator D?
ESD Protection Diodes / TVS Diodes TVS, SMA, 150C, 400W, Unidir; Manufacturer: Diotec Semiconductor; Breakdown voltage: 5V; Package: DO-214AC-2; Supplier 1: Mouser; Supplier Part Number 1: 637-P4SMAJ5.0A
footprint DIOC_DO-214AC
pins: 1, 2

## P4SMAJ12A
designator D?
ESD Protection Diodes / TVS Diodes TVS, SMA, 150C, 400W, Unidir; Manufacturer: Diotec Semiconductor; Breakdown voltage: 12V; Package: DO-214AC-2; Supplier 1: Mouser; Supplier Part Number 1: 637-P4SMAJ12A
footprint DIOC_DO-214AC
pins: 1, 2

## PESD3V3V1BLYL
designator D?
ESD Protection Diodes / TVS Diodes SOD882 3.3V BID ESD PROTECT; Manufacturer: Nexperia; Capacitance: 11pF; Package: DFN-1006-2; Voltage: 3.3V; Supplier 1: Mouser; Supplier Part Number 1: 771-PESD3V3V1BLYL
footprint DIOC_DFN-1006-2
pins: 1, 2

## PESD4USB5B-TBSX
designator D?
ESD Protection Diodes / TVS Diodes ESD 5V BI; Manufacturer: Nexperia; Capacitance: 0.3pF; Package: DFN-2510D-10; Voltage: 5V; Supplier 1: Mouser; Supplier Part Number 1: 771-PESD4USB5B-TBSX
footprint DIOC_DFN-2510A-10
pins: 1, 2, 3, 4, 5, 6 NC, 7 NC, 8, 9 NC, 10 NC

## PESD5V0L1BA-QX
designator D?
ESD Protection Diodes / TVS Diodes ESD 5V BI; Manufacturer: Nexperia; Capacitance: 75pF; Package: SOD-323-2; Voltage: 5V; Supplier 1: Mouser; Supplier Part Number 1: 771-PESD5V0L1BA-QX
footprint DIOC_SOD323
pins: 1, 2

## PESD12VS1UA
designator D?
ESD Protection Diodes / TVS Diodes ESD 12V UNI; Manufacturer: Nexperia; Capacitance: 180pF; Package: SOD-323-2; Voltage: 12V; Supplier 1: Mouser; Supplier Part Number 1: 771-PESD12S1UA115
footprint DIOC_SOD323
pins: 1, 2

## PMEG3030EXEX
designator D?
Schottky Diodes & Rectifiers RECT 30V 3A SM SCHOTTKY; Manufacturer: Nexperia; Forward Voltage: 500mV; Package: SOD123HP-2; Current: 3A; Supplier 1: Mouser; Supplier Part Number 1: 771-PMEG3030EXEX
footprint DIOC_SOD123HP-2
pins: 1, 2

## RC0402FR-7D4K7L
designator R?  value 4.7kR  Package: 0402  Tolerance: 1%  Power: 62.5mW  (hidden comment: RC0402FR-7D4K7L)
Thick Film Resistors - SMD General Purpose Chip Resistor 0402, 4.7kOhms, 1%, 1/16W; Manufacturer: YAGEO; Supplier 1: Mouser; Supplier Part Number 1: 603-RC0402FR-7D4K7L
footprint RESC_0402 (Chip Resistor, 2-Leads, Body 1,00x0,50mm, IPC Medium Density)
pins: 1, 2

## RC0402JR-7D1KL
designator R?  value 1kR  Package: 0402  Tolerance: 5%  Power: 62.5mW  (hidden comment: RC0402JR-7D1KL)
Thick Film Resistors - SMD General Purpose Chip Resistor 0402, 1kOhms, 5%, 1/16W; Manufacturer: YAGEO; Supplier 1: Mouser; Supplier Part Number 1: 603-RC0402JR-7D1KL
footprint RESC_0402 (Chip Resistor, 2-Leads, Body 1,00x0,50mm, IPC Medium Density)
pins: 1, 2

## RC0603FR-7W3KL
designator R?  value 3kR  Package: 0603  Tolerance: 1%  Power: 200mW  (hidden comment: RC0603FR-7W3KL)
Thick Film Resistors 2.2 kOhms 1/5 W 75 V 1% 0603 100 PPM / C - 55 C / + 155 C AEC-Q200; Manufacturer: YAGEO; Supplier 1: Mouser; Supplier Part Number 1: 603-RC0603FR-7W3KL
footprint RESC_0603 (Chip Resistor, 2-Leads, Body 1,55x0,85mm, IPC Medium Density)
pins: 1, 2

## RC0603FR-07560RL
designator R?  value 560R  Package: 0603  Tolerance: 1%  Power: 100mW  (hidden comment: RC0603FR-07560RL)
Thick Film Resistors - SMD General Purpose Chip Resistor 0603, 560Ohms, 1%, 1/10W; Manufacturer: YAGEO; Supplier 1: Mouser; Supplier Part Number 1: 603-RC0603FR-07560RL
footprint RESC_0603 (Chip Resistor, 2-Leads, Body 1,55x0,85mm, IPC Medium Density)
pins: 1, 2

## RC0805FR-070RL
designator R?  value 0R  Package: 0805  Tolerance: 1%  Power: 125mW  (hidden comment: RC0805FR-070RL)
Thick Film Resistors - SMD General Purpose Chip Resistor 0805, 0Ohms, 1%, 1/8W; Manufacturer: YAGEO; Supplier 1: Mouser; Supplier Part Number 1: 603-RC0805FR-070RL
footprint RESC_0805 (Chip Resistor, 2-Leads, Body 2,00x1,25mm, IPC Medium Density)
pins: 1, 2

## RC0805JR-070RP
designator R?  value 0R  Package: 0805  Tolerance: 5%  Power: 125mW  (hidden comment: RC0805JR-070RP)
Thick Film Resistors - SMD General Purpose Chip Resistor 0805, 0Ohms, 5%, 1/8W; Manufacturer: YAGEO; Supplier 1: Mouser; Supplier Part Number 1: 603-RC0805JR-070RP
footprint RESC_0805 (Chip Resistor, 2-Leads, Body 2,00x1,25mm, IPC Medium Density)
pins: 1, 2

## RG1005R-330-D-T10
designator R?  value 33R  Package: 0402  Tolerance: 0.5%  Power: 62.5mW  (hidden comment: RG1005R-330-D-T10)
Thin Film Resistors - SMD 1/16W 33 Ohms 0.5% 0402 100ppm; Manufacturer: Susumu; Supplier 1: Mouser; Supplier Part Number 1: 754-RG1005R-330DT10
footprint RESC_0402 (Chip Resistor, 2-Leads, Body 1,00x0,50mm, IPC Medium Density)
pins: 1, 2

## RG1608P-4992-B-T5
designator R?  value 49.9kR  Package: 0603  Tolerance: 0.1%  Power: 100mW  (hidden comment: RG1608P-4992-B-T5)
Thin Film Resistors 1/10W 49.9K Ohm 0.1% 0603 25ppm; Manufacturer: Susumu; Supplier 1: Mouser; Supplier Part Number 1: 754-RG1608P-4992-BT5
footprint RESC_0603 (Chip Resistor, 2-Leads, Body 1,55x0,85mm, IPC Medium Density)
pins: 1, 2

## RP0603BRD071KL
designator R?  value 1kR  Package: 0603  Tolerance: 0.1%  Power: 100mW  (hidden comment: RP0603BRD071KL)
Thin Film Resistors 1/10 Wat 1K Ohm 0.1% 0603 AEC-Q200; Manufacturer: YAGEO; Supplier 1: Mouser; Supplier Part Number 1: 603-RP0603BRD071KL
footprint RESC_0603 (Chip Resistor, 2-Leads, Body 1,55x0,85mm, IPC Medium Density)
pins: 1, 2

## RP0603BRD072K67L
designator R?  value 2.67kR  Package: 0603  Tolerance: 0.1%  Power: 100mW  (hidden comment: RP0603BRD072K67L)
Thin Film Resistors 1/10W 2.67K Ohm 0.1% 0603 AEC-Q200; Manufacturer: YAGEO; Supplier 1: Mouser; Supplier Part Number 1: 603-RP0603BRD072K67L
footprint RESC_0603 (Chip Resistor, 2-Leads, Body 1,55x0,85mm, IPC Medium Density)
pins: 1, 2

## RP0603BRD073K65L
designator R?  value 3.65kR  Package: 0603  Tolerance: 0.1%  Power: 100mW  (hidden comment: RP0603BRD073K65L)
Thin Film Resistors 1/10W 3.65K Ohm 0.1% 0603 AEC-Q200; Manufacturer: YAGEO; Supplier 1: Mouser; Supplier Part Number 1: 603-RP0603BRD073K65L
footprint RESC_0603 (Chip Resistor, 2-Leads, Body 1,55x0,85mm, IPC Medium Density)
pins: 1, 2

## RP0603BRD076K81L
designator R?, comment value 6.81kR  Package: 0603  Tolerance: 0.1%  Power: 100mW  (hidden comment: RP0603BRD073K65L)
Thin Film Resistors 1/10W 6.81K Ohm 0.1% 0603 AEC-Q200; Manufacturer: YAGEO; Supplier 1: Mouser; Supplier Part Number 1: 603-RP0603BRD073K65L
footprint RESC_0603 (Chip Resistor, 2-Leads, Body 1,55x0,85mm, IPC Medium Density)
pins: 1, 2

## RP0603BRD0710KL
designator R?  value 10kR  Package: 0603  Tolerance: 0.1%  Power: 100mW  (hidden comment: RP0603BRD0710KL)
Thin Film Resistors 1/10 Wa 10K Ohm 0.1% 0603 AEC-Q200; Manufacturer: YAGEO; Supplier 1: Mouser; Supplier Part Number 1: 603-RP0603BRD0710KL
footprint RESC_0603 (Chip Resistor, 2-Leads, Body 1,55x0,85mm, IPC Medium Density)
pins: 1, 2

## RP0603BRD0724K9L
designator R?  value 24.9kR  Package: 0603  Tolerance: 0.1%  Power: 100mW  (hidden comment: RP0603BRD0724K9L)
Thin Film Resistors 1/10W 24.9K Ohm 0.1% 0603 AEC-Q200; Manufacturer: YAGEO; Supplier 1: Mouser; Supplier Part Number 1: 603-RP0603BRD0724K9L
footprint RESC_0603 (Chip Resistor, 2-Leads, Body 1,55x0,85mm, IPC Medium Density)
pins: 1, 2

## RP0603BRD0727KL
designator R?  value 27kR  Package: 0603  Tolerance: 0.1%  Power: 100mW  (hidden comment: RP0603BRD0727KL)
Thin Film Resistors 1/10 Wa 27K Ohm 0.1% 0603 AEC-Q200; Manufacturer: YAGEO; Supplier 1: Mouser; Supplier Part Number 1: 603-RP0603BRD0727KL
footprint RESC_0603 (Chip Resistor, 2-Leads, Body 1,55x0,85mm, IPC Medium Density)
pins: 1, 2

## RT0402BRD0733RL
designator R?  value 33R  Package: 0402  Tolerance: 0.1%  Power: 62.5mW  (hidden comment: RT0402BRD0733RL)
Thin Film Resistors 1/16W 33 ohm .1% 25ppm; Manufacturer: YAGEO; Supplier 1: Mouser; Supplier Part Number 1: 603-RT0402BRD0733RL
footprint RESC_0402 (Chip Resistor, 2-Leads, Body 1,00x0,50mm, IPC Medium Density)
pins: 1, 2

## RT0603BRC073K92L
designator R?  value 3.92kR  Package: 0603  Tolerance: 0.1%  Power: 100mW  (hidden comment: RT0603BRC073K92L)
Thin Film Resistors 1/10W 3.92K ohm .1% 15ppm; Manufacturer: YAGEO; Supplier 1: Mouser; Supplier Part Number 1: 603-RT0603BRC073K92L
footprint RESC_0603 (Chip Resistor, 2-Leads, Body 1,55x0,85mm, IPC Medium Density)
pins: 1, 2

## RT0603BRC0749K9L
designator R?  value 49.9kR  Package: 0603  Tolerance: 0.1%  Power: 100mW  (hidden comment: RT0603BRC0749K9L)
Thin Film Resistors 49.9K ohm .1% 15 ppm High-Precision; Manufacturer: YAGEO; Supplier 1: Mouser; Supplier Part Number 1: 603-RT0603BRC0749K9L
footprint RESC_0603 (Chip Resistor, 2-Leads, Body 1,55x0,85mm, IPC Medium Density)
pins: 1, 2

## RT0603BRD072KL
designator R?  value 2kR  Package: 0603  Tolerance: 0.1%  Power: 100mW  (hidden comment: RT0603BRD072KL)
Thin Film Resistors 2K OHM .1% 25PPM; Manufacturer: YAGEO; Supplier 1: Mouser; Supplier Part Number 1: 603-RT0603BRD072KL
footprint RESC_0603 (Chip Resistor, 2-Leads, Body 1,55x0,85mm, IPC Medium Density)
pins: 1, 2

## RT0603BRD0710K5L
designator R?  value 10.5kR  Package: 0603  Tolerance: 0.1%  Power: 100mW  (hidden comment: RT0603BRD0710K5L)
Thin Film Resistors 1/10W 10.5K ohm .1% 25ppm; Manufacturer: YAGEO; Supplier 1: Mouser; Supplier Part Number 1: 603-RT0603BRD0710K5L
footprint RESC_0603 (Chip Resistor, 2-Leads, Body 1,55x0,85mm, IPC Medium Density)
pins: 1, 2

## RT0603BRD0710KL
designator R?  value 10kR  Package: 0603  Tolerance: 0.1%  Power: 100mW  (hidden comment: RT0603BRD0710KL)
Thin Film Resistors 10K ohm 0.1% 1/10W; Manufacturer: YAGEO; Supplier 1: Mouser; Supplier Part Number 1: 603-RT0603BRD0710KL
footprint RESC_0603 (Chip Resistor, 2-Leads, Body 1,55x0,85mm, IPC Medium Density)
pins: 1, 2

## RT0603BRD0722K1L
designator R?  value 22.1kR  Package: 0603  Tolerance: 0.1%  Power: 100mW  (hidden comment: RT0603BRD0722K1L)
Thin Film Resistors 1/10W 22.1K ohm .1% 25ppm; Manufacturer: YAGEO; Supplier 1: Mouser; Supplier Part Number 1: 603-RT0603BRD0722K1L
footprint RESC_0603 (Chip Resistor, 2-Leads, Body 1,55x0,85mm, IPC Medium Density)
pins: 1, 2

## RT0603BRD0731K6L
designator R?  value 31.6kR  Package: 0603  Tolerance: 0.1%  Power: 100mW  (hidden comment: RT0603BRD0731K6L)
Thin Film Resistors 1/10W 31.6K ohm .1% 25ppm; Manufacturer: YAGEO; Supplier 1: Mouser; Supplier Part Number 1: 603-RT0603BRD0731K6L
footprint RESC_0603 (Chip Resistor, 2-Leads, Body 1,55x0,85mm, IPC Medium Density)
pins: 1, 2

## RT0603BRD0744K2L
designator R?  value 44.2kR  Package: 0603  Tolerance: 0.1%  Power: 100mW  (hidden comment: RT0603BRD0744K2L)
Thin Film Resistors 1/10W 44.2K ohm .1% 25ppm; Manufacturer: YAGEO; Supplier 1: Mouser; Supplier Part Number 1: 603-RT0603BRD0744K2L
footprint RESC_0603 (Chip Resistor, 2-Leads, Body 1,55x0,85mm, IPC Medium Density)
pins: 1, 2

## RT0603BRD0747K5L
designator R?  value 47.5kR  Package: 0603  Tolerance: 0.1%  Power: 100mW  (hidden comment: RT0603BRD0747K5L)
Thin Film Resistors 1/10W 47.5K ohm .1% 25ppm; Manufacturer: YAGEO; Supplier 1: Mouser; Supplier Part Number 1: 603-RT0603BRD0747K5L
footprint RESC_0603 (Chip Resistor, 2-Leads, Body 1,55x0,85mm, IPC Medium Density)
pins: 1, 2

## RT0603BRD0759KL
designator R?  value 59kR  Package: 0603  Tolerance: 0.1%  Power: 100mW  (hidden comment: RT0603BRD0759KL)
Thin Film Resistors 1/10W 59K ohm .1% 25ppm; Manufacturer: YAGEO; Supplier 1: Mouser; Supplier Part Number 1: 603-RT0603BRD0759KL
footprint RESC_0603 (Chip Resistor, 2-Leads, Body 1,55x0,85mm, IPC Medium Density)
pins: 1, 2

## RT0603BRD0782KL
designator R?  value 82kR  Package: 0603  Tolerance: 0.1%  Power: 100mW  (hidden comment: RT0603BRD0782KL)
Thin Film Resistors 1/10W 82K ohm .1% 25ppm; Manufacturer: YAGEO; Supplier 1: Mouser; Supplier Part Number 1: 603-RT0603BRD0782KL
footprint RESC_0603 (Chip Resistor, 2-Leads, Body 1,55x0,85mm, IPC Medium Density)
pins: 1, 2

## RT0603BRD07442RL
designator R?  value 442R  Package: 0603  Tolerance: 0.1%  Power: 100mW  (hidden comment: RT0603BRD07442RL)
Thin Film Resistors 1/10W 442 ohm .1% 25ppm; Manufacturer: YAGEO; Supplier 1: Mouser; Supplier Part Number 1: 603-RT0603BRD07442RL
footprint RESC_0603 (Chip Resistor, 2-Leads, Body 1,55x0,85mm, IPC Medium Density)
pins: 1, 2

## RT0603BRE07220RL
designator R?  value 220R  Package: 0603  Tolerance: 0.1%  Power: 100mW  (hidden comment: RT0603BRE07220RL)
Thin Film Resistors; Manufacturer: YAGEO; Supplier 1: Mouser; Supplier Part Number 1: 603-RT0603BRE07220RL
footprint RESC_0603 (Chip Resistor, 2-Leads, Body 1,55x0,85mm, IPC Medium Density)
pins: 1, 2

## RT0603DRD0715KL
designator R?  value 15kR  Package: 0603  Tolerance: 0.5%  Power: 100mW  (hidden comment: RT0603DRD0715KL)
Thin Film Resistors 15K Ohm 0.5% 1/10W 75 Volts 25ppm; Manufacturer: YAGEO; Supplier 1: Mouser; Supplier Part Number 1: 603-RT0603DRD0715KL
footprint RESC_0603 (Chip Resistor, 2-Leads, Body 1,55x0,85mm, IPC Medium Density)
pins: 1, 2

## RT0603DRD0775KL
designator R?  value 75kR  Package: 0603  Tolerance: 0.5%  Power: 100mW  (hidden comment: RT0603DRD0775KL)
Thin Film Resistors 1/10W 75K ohm .5% 25ppm; Manufacturer: YAGEO; Supplier 1: Mouser; Supplier Part Number 1: 603-RT0603DRD0775KL
footprint RESC_0603 (Chip Resistor, 2-Leads, Body 1,55x0,85mm, IPC Medium Density)
pins: 1, 2

## RT0603DRE0734KL
designator R?  value 34kR  Package: 0603  Tolerance: 0.5%  Power: 100mW  (hidden comment: RT0603DRE0734KL)
Thin Film Resistors 1/10W 34K ohm .5% 50ppm; Manufacturer: YAGEO; Supplier 1: Mouser; Supplier Part Number 1: 603-RT0603DRE0734KL
footprint RESC_0603 (Chip Resistor, 2-Leads, Body 1,55x0,85mm, IPC Medium Density)
pins: 1, 2

## RT0603DRE0739KL
designator R?  value 39kR  Package: 0603  Tolerance: 0.5%  Power: 100mW  (hidden comment: RT0603DRE0739KL)
Thin Film Resistors 39K OHM .5% 50PPM 1/10W; Manufacturer: YAGEO; Supplier 1: Mouser; Supplier Part Number 1: 603-RT0603DRE0739KL
footprint RESC_0603 (Chip Resistor, 2-Leads, Body 1,55x0,85mm, IPC Medium Density)
pins: 1, 2

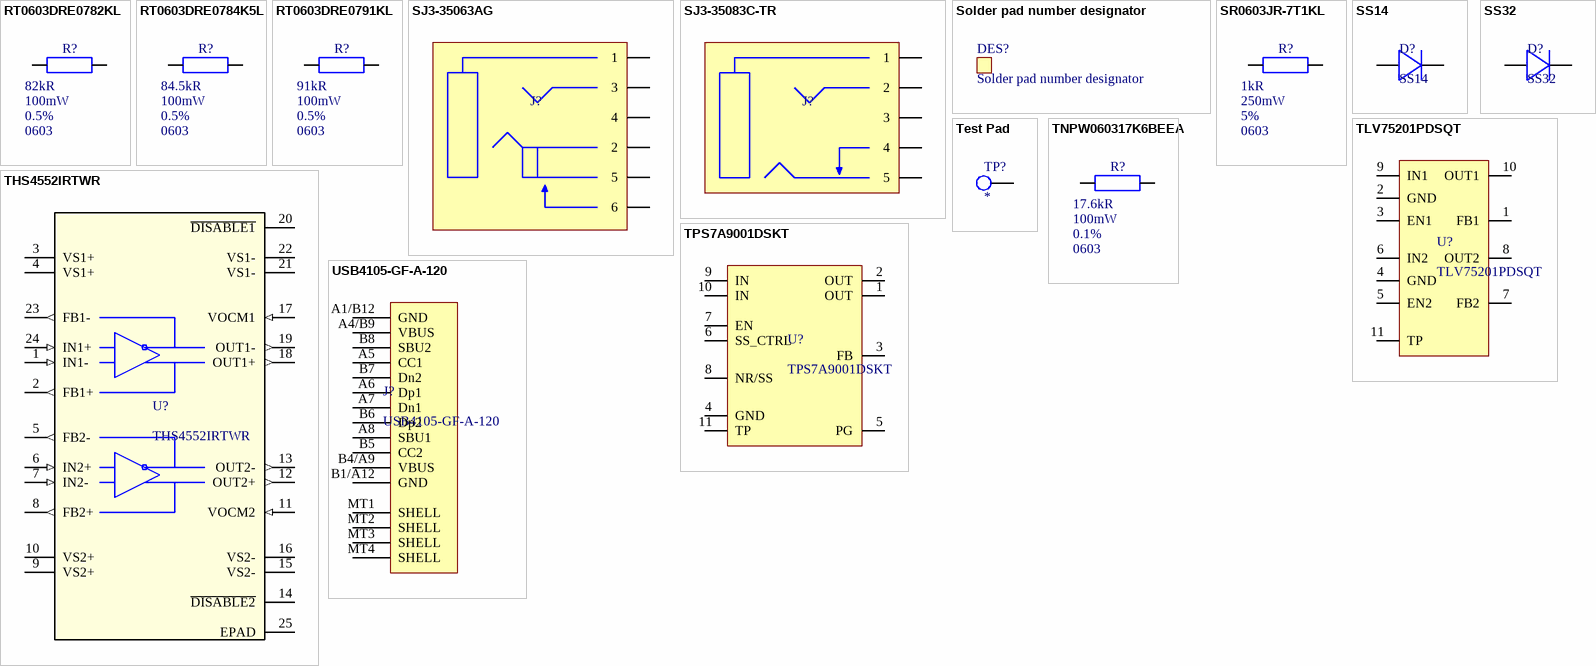
[diagram p3: symbols RT0603DRE0782KL to USB4105-GF-A-120]

## RT0603DRE0782KL
designator R?  value 82kR  Package: 0603  Tolerance: 0.5%  Power: 100mW  (hidden comment: RT0603DRE0782KL)
Thin Film Resistors - SMD; Manufacturer: YAGEO; Supplier 1: Mouser; Supplier Part Number 1: 603-RT0603DRE0782KL
footprint RESC_0603 (Chip Resistor, 2-Leads, Body 1,55x0,85mm, IPC Medium Density)
pins: 1, 2

## RT0603DRE0784K5L
designator R?  value 84.5kR  Package: 0603  Tolerance: 0.5%  Power: 100mW  (hidden comment: RT0603DRE0784K5L)
Thin Film Resistors 1/10W 84.5K Ohms .5%; Manufacturer: YAGEO; Supplier 1: Mouser; Supplier Part Number 1: 603-RT0603DRE0784K5L
footprint RESC_0603 (Chip Resistor, 2-Leads, Body 1,55x0,85mm, IPC Medium Density)
pins: 1, 2

## RT0603DRE0791KL
designator R?  value 91kR  Package: 0603  Tolerance: 0.5%  Power: 100mW  (hidden comment: RT0603DRE0791KL)
Thin Film Resistors; Manufacturer: YAGEO; Supplier 1: Mouser; Supplier Part Number 1: 603-RT0603DRE0791KL
footprint RESC_0603 (Chip Resistor, 2-Leads, Body 1,55x0,85mm, IPC Medium Density)
pins: 1, 2

## SJ3-35063AG
designator J?  (value not drawn)
Phone Connectors Audio Jack, 3.5mm, Through Hole, 3 Conductors, 1 Switches; Manufacturer: Same Sky; Supplier 1: Mouser; Supplier Part Number 1: 179-SJ3-35063AG
footprint CONT_SJ3-35063AG
pins: 1, 2, 3, 4, 5, 6

## SJ3-35083C-TR
designator J?  (value not drawn)
Phone Connectors Audio Jack, 3.5mm, Through Hole, 3 Conductors, 1 Switches; Manufacturer: Same Sky; Supplier 1: Mouser; Supplier Part Number 1: 179-SJ3-35083C-TR
footprint CONT_SJ3-35083C-TR
pins: 1, 2, 3, 4, 5

## Solder pad number designator
designator DES?
footprint DES_NUMBER

## SR0603JR-7T1KL
designator R?  value 1kR  Package: 0603  Tolerance: 5%  Power: 250mW  (hidden comment: SR0603JR-7T1KL)
Thick Film Resistors - SMD 1 kOhms 1/4 W 0603 5 % AEC-Q200; Manufacturer: YAGEO; Supplier 1: Mouser; Supplier Part Number 1: 603-SR0603JR-7T1KL
footprint RESC_0603 (Chip Resistor, 2-Leads, Body 1,55x0,85mm, IPC Medium Density)
pins: 1, 2

## SS14
designator D?
Schottky Diodes & Rectifiers 3a 20V Rectifier Schottky Barrier; Manufacturer: onsemi / Fairchild; Forward Voltage: 500mV; Current: 1A; Package: DO-214AC; Supplier 1: Mouser; Supplier Part Number 1: 512-SS14
footprint DIOC_DO-214AC
pins: 1, 2

## SS32
designator D?
Schottky Diodes & Rectifiers 3a 20V Rectifier Schottky Barrier; Manufacturer: onsemi / Fairchild; Forward Voltage: 500mV; Package: DO-214AB; Current: 3A; Supplier 1: Mouser; Supplier Part Number 1: 512-SS32
footprint DIOC_RD_DO-214AB_P
pins: 1, 2

## Test Pad
designator TP?
footprint TP_0.75mm
footprint TP_1mm
footprint TP_1.4mm
pins: 1

## THS4552IRTWR
designator U?
Differential Amplifiers Dual Channel Low-No ise Precision 150- A 595-THS4552IRTWT; Manufacturer: Texas Instruments; Package: LFCSP-24; Supplier 1: Mouser; Supplier Part Number 1: 595-THS4552IRTWR
footprint IC_QFN-24_UF_LIT
pins: 1 IN1- (in), 2 FB1+ (out), 3 VS1+ (power), 4 VS1+ (power), 5 FB2- (out), 6 IN2+ (in), 7 IN2- (in), 8 FB2+ (out), 9 VS2+ (power), 10 VS2+ (power), 11 VOCM2 (in), 12 OUT2+ (out), 13 OUT2- (out), 14 ~{DISABLE2}, 15 VS2- (power), 16 VS2- (power), 17 VOCM1 (in), 18 OUT1+ (out), 19 OUT1- (out), 20 ~{DISABLE1}, 21 VS1- (power), 22 VS1- (power), 23 FB1- (out), 24 IN1+ (in), 25 EPAD

## TLV75201PDSQT
designator U?
LDO Voltage Regulators 1-A low-IQ high-PS RR adjustable dual A 595-TLV75201PDSQR; Manufacturer: Texas Instruments; Package: WSON-10; Supplier 1: Mouser; Supplier Part Number 1: 595-TLV75201PDSQT
footprint IC_WSON-10
pins: 1 FB1, 2 GND, 3 EN1, 4 GND, 5 EN2, 6 IN2, 7 FB2, 8 OUT2, 9 IN1, 10 OUT1, 11 TP

## TNPW060317K6BEEA
designator R?  value 17.6kR  Package: 0603  Tolerance: 0.1%  Power: 100mW  (hidden comment: TNPW060317K6BEEA)
Thin Film Resistors 17.6Kohms .1% 25ppm; Manufacturer: Vishay; Supplier 1: Mouser; Supplier Part Number 1: 71-TNPW060317K6BEEA
footprint RESC_0603 (Chip Resistor, 2-Leads, Body 1,55x0,85mm, IPC Medium Density)
pins: 1, 2

## TPS7A9001DSKT
designator U?
LDO Voltage Regulators 500-mA low-noise h igh-PSRR adjustable A 595-TPS7A9001DSKR; Manufacturer: Texas Instruments; Package: SON-10; Supplier 1: Mouser; Supplier Part Number 1: 595-TPS7A9001DSKT
footprint IC_SON-10
pins: 1 OUT, 2 OUT, 3 FB, 4 GND, 5 PG, 6 SS_CTRL, 7 EN, 8 NR/SS, 9 IN, 10 IN, 11 TP

## USB4105-GF-A-120
designator J?
USB Connectors USB Type C, 2.0 SMT PCB Top Mnt 1.20mm; Manufacturer: GCT; Supplier 1: Mouser; Supplier Part Number 1: 640-USB4105-GF-A-120
footprint CONT_USB4105-GF-A-120
pins: A1/B12 GND, A4/B9 VBUS, A5 CC1, A6 Dp1, A7 Dn1, A8 SBU1, B1/A12 GND, B4/A9 VBUS, B5 CC2, B6 Dp2, B7 Dn2, B8 SBU2, MT1 SHELL, MT2 SHELL, MT3 SHELL, MT4 SHELL